# Altium schematic symbol library MSP432DIBAN - 副本.SchLib: 1 symbol
Pins are listed as number, name and electrical type; pins without a type are passive.

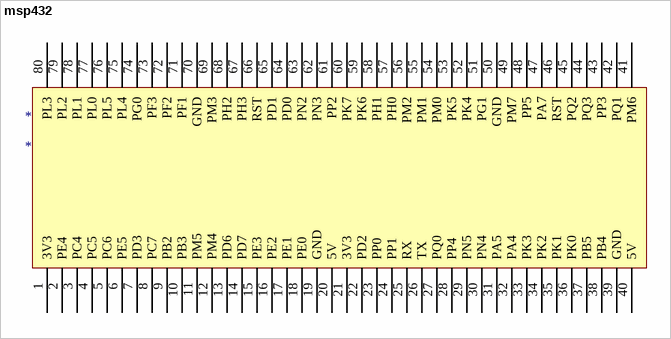
[diagram p0: symbol msp432]

## msp432
designator *
pins: 1 3V3, 2 PE4, 3 PC4, 4 PC5, 5 PC6, 6 PE5, 7 PD3, 8 PC7, 9 PB2, 10 PB3, 11 PM5, 12 PM4, 13 PD6, 14 PD7, 15 PE3, 16 PE2, 17 PE1, 18 PE0, 19 GND, 20 5V, 21 3V3, 22 PD2, 23 PP0, 24 PP1, 25 RX, 26 TX, 27 PQ0, 28 PP4, 29 PN5, 30 PN4, 31 PA5, 32 PA4, 33 PK3, 34 PK2, 35 PK1, 36 PK0, 37 PB5, 38 PB4, 39 GND, 40 5V, 41 PM6, 42 PQ1, 43 PP3, 44 PQ3, 45 PQ2, 46 RST, 47 PA7, 48 PP5, 49 PM7, 50 GND, 51 PG1, 52 PK4, 53 PK5, 54 PM0, 55 PM1, 56 PM2, 57 PH0, 58 PH1, 59 PK6, 60 PK7, 61 PP2, 62 PN3, 63 PN2, 64 PD0, 65 PD1, 66 RST, 67 PH3, 68 PH2, 69 PM3, 70 GND, 71 PF1, 72 PF2, 73 PF3, 74 PG0, 75 PL4, 76 PL5, 77 PL0, 78 PL1, 79 PL2, 80 PL3